# Altium footprint library LUCID_LIGHT_Passives.PcbLib: 7 footprints
Each footprint in its own frame and in the unit in brackets; x right, y up, seen from the top. Pads: shape width x height; smd on the part's side, far side on the other; paste and mask are expansions set on the pad; w line width, h text height; cw(c..) or ccw(c..) is an arc to the next point about the centre after c.
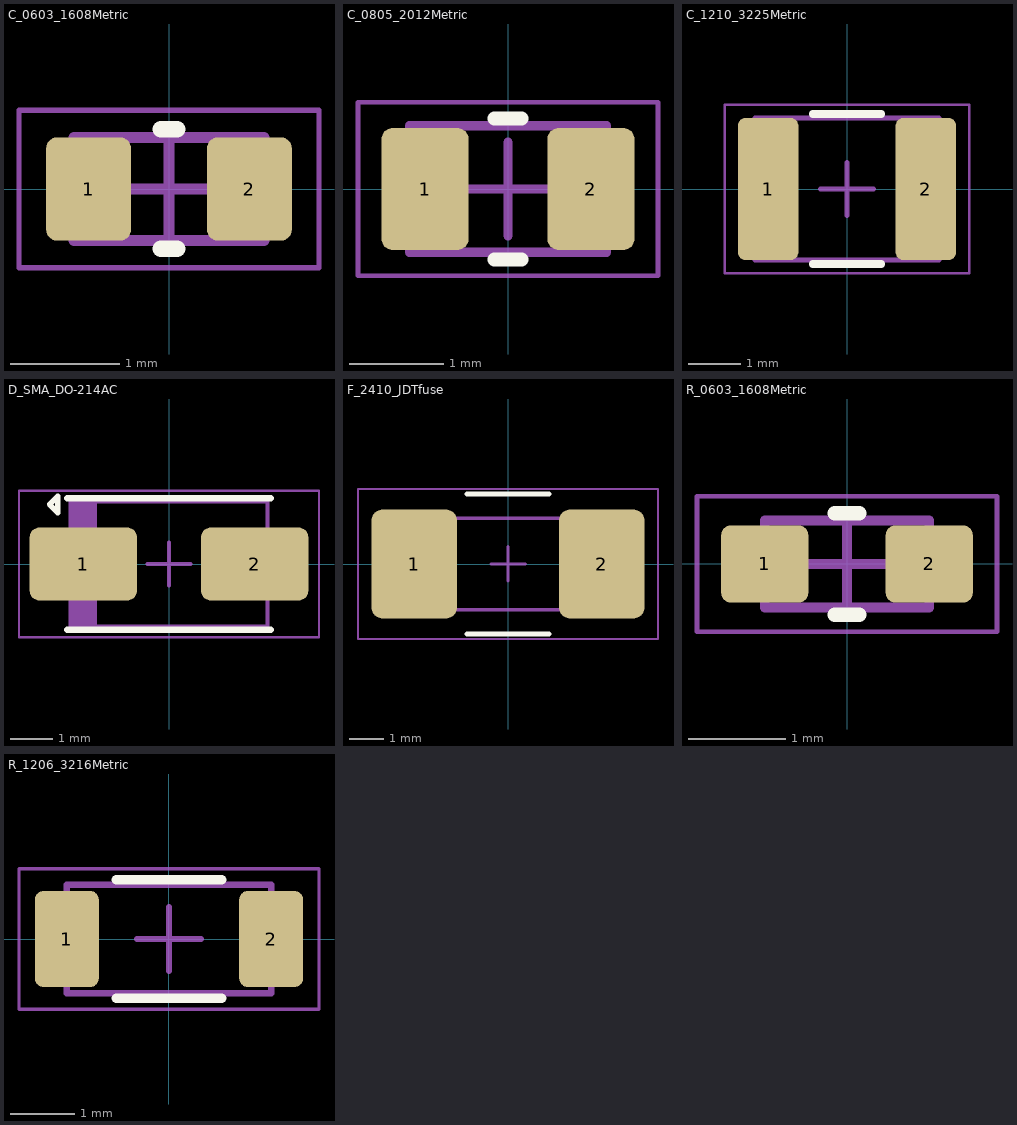
[diagram p0: the footprints below, top view; thin cyan lines are the x and y axes]

## C_0603_1608Metric [mm] "Chip Ceramic Capacitor, 2-Leads, Body 1.60x0.80mm, IPC Medium Density, Samsung 0603 Reference"
height 0.95
pads (2):
  rrect25% 0.78x0.95 smd: 1(-0.74,0) 2(0.74,0)
Top Overlay:
  lines w0.15: -0.075,-0.55 0.075,-0.55 ; -0.075,0.55 0.075,0.55
Mechanical 13:
  lines w0.1: -0.875,-0.475 -0.875,0.475 0.875,0.475 0.875,-0.475 -0.875,-0.475
Mechanical 15:
  lines w0.05: -1.38,-0.725 -1.38,0.725 1.38,0.725 1.38,-0.725 -1.38,-0.725
  lines w0.1: -0.475,0 0.475,0 ; 0,-0.475 0,0.475
3D body: height 0.95, standoff 0, extent -0.575,-0.475 0.575,0.475
3D body: height 0.95, standoff 0, extent -0.875,-0.475 -0.575,0.475
3D body: height 0.95, standoff 0, extent 0.575,-0.475 0.875,0.475

## C_0805_2012Metric [mm] "Chip Ceramic Capacitor, 2-Leads, Body 2.00x1.25mm, IPC Medium Density, Samsung 0805 Reference"
height 1.35
pads (2):
  rrect25% 0.93x1.3 smd: 1(-0.885,0) 2(0.885,0)
Top Overlay:
  lines w0.15: -0.145,-0.75 0.145,-0.75 ; -0.145,0.75 0.145,0.75
Mechanical 13:
  lines w0.1: -1.05,-0.675 1.05,-0.675 1.05,0.675 -1.05,0.675 -1.05,-0.675
Mechanical 15:
  lines w0.05: -1.6,-0.925 1.6,-0.925 1.6,0.925 -1.6,0.925 -1.6,-0.925
  lines w0.1: -0.5,0 0.5,0 ; 0,-0.5 0,0.5
3D body: height 1.35, standoff 0, extent 0.6,-0.675 1.05,0.675
3D body: height 1.35, standoff 0, extent -1.05,-0.675 -0.6,0.675
3D body: height 1.35, standoff 0, extent -0.6,-0.675 0.6,0.675

## C_1210_3225Metric [mm] "Chip Ceramic Capacitor, 2-Leads, Body 3.20x2.50mm, IPC Medium Density, KEMET 1210 Reference"
height 2.2
pads (2):
  rrect25% 1.15x2.7 smd: 1(-1.5,0) 2(1.5,0)
Top Overlay:
  lines w0.15: -0.65,-1.425 0.65,-1.425 ; -0.65,1.425 0.65,1.425
Mechanical 13:
  lines w0.1: -1.75,-1.35 -1.75,1.35 1.75,1.35 1.75,-1.35 -1.75,-1.35
Mechanical 15:
  lines w0.05: -2.325,-1.6 -2.325,1.6 2.325,1.6 2.325,-1.6 -2.325,-1.6
  lines w0.1: -0.5,0 0.5,0 ; 0,-0.5 0,0.5
3D body: height 2.2, standoff 0, extent -1.25,-1.35 1.25,1.35
3D body: height 2.2, standoff 0, extent -1.75,-1.35 -1.25,1.35
3D body: height 2.2, standoff 0, extent 1.25,-1.35 1.75,1.35

## D_SMA_DO-214AC [mm] "Molded Diode, 2-Leads, Body 4.30x2.61mm, IPC Medium Density"
height 2.4
pads (2):
  rrect25% 2.5x1.7 smd: 1(-2,0) 2(2,0)
Top Overlay:
  lines w0.127: -2.787,1.39 -2.597,1.2 -2.597,1.58 -2.787,1.39
  lines w0.15: -2.375,-1.535 2.375,-1.535 ; -2.375,1.535 2.375,1.535
Mechanical 13:
  rectangle: -2.3,-1.46 -1.681,1.46
  lines w0.1: -2.3,-1.46 -2.3,1.46 2.3,1.46 2.3,-1.46 -2.3,-1.46
Mechanical 15:
  lines w0.05: -3.5,-1.71 -3.5,1.71 3.5,1.71 3.5,-1.71 -3.5,-1.71
  lines w0.1: -0.5,0 0.5,0 ; 0,-0.5 0,0.5
3D body: height 2.4, standoff 0, extent -2.3,-1.46 2.3,1.46

## F_2410_JDTfuse [mm] "20A Fuse 72V"
height 2.94
pads (2):
  rrect25% 2.5x3.2 smd: 1(-2.75,0) 2(2.75,0)
Top Overlay:
  lines w0.15: -1.2,-2.05 1.2,-2.05 ; -1.2,2.05 1.2,2.05
Mechanical 13:
  lines w0.1: -3.09,-1.34 3.09,-1.34 3.09,1.34 -3.09,1.34 -3.09,-1.34
Mechanical 15:
  lines w0.05: -4.4,-2.2 4.4,-2.2 4.4,2.2 -4.4,2.2 -4.4,-2.2
  lines w0.1: -0.5,0 0.5,0 ; 0,-0.5 0,0.5
3D body: height 2.94, standoff 0, extent 1.7,-1.47 3.15,1.47
3D body: height 2.94, standoff 0, extent -3.15,-1.47 -1.7,1.47
3D body: height 2.94, standoff 0, extent -1.7,-1.47 1.7,1.47

## R_0603_1608Metric [mm] "Chip Resistor, 2-Leads, Body 1.60x0.80mm, IPC Medium Density"
height 0.55
pads (2):
  rrect25% 0.9x0.8 smd: 1(-0.85,0) 2(0.85,0)
Top Overlay:
  lines w0.15: -0.125,-0.525 0.125,-0.525 ; -0.125,0.525 0.125,0.525
Mechanical 13:
  lines w0.1: -0.85,-0.45 -0.85,0.45 0.85,0.45 0.85,-0.45 -0.85,-0.45
Mechanical 15:
  lines w0.05: -1.55,-0.7 -1.55,0.7 1.55,0.7 1.55,-0.7 -1.55,-0.7
  lines w0.1: -0.45,0 0.45,0 ; 0,-0.45 0,0.45
3D body: height 0.55, standoff 0, extent -0.6,-0.45 0.6,0.45
3D body: height 0.55, standoff 0, extent -0.85,-0.45 -0.6,0.45
3D body: height 0.55, standoff 0, extent 0.6,-0.45 0.85,0.45

## R_1206_3216Metric [mm] "Chip Resistor, 2-Leads, Body 3.20x1.60mm, IPC Medium Density, JLCPCB-compatible land pattern"
height 0.65
pads (2):
  rrect25% 1x1.5 smd: 1(-1.6,0) 2(1.6,0)
Top Overlay:
  lines w0.15: -0.825,-0.925 0.825,-0.925 ; -0.825,0.925 0.825,0.925
Mechanical 13:
  lines w0.1: -1.6,-0.85 -1.6,0.85 1.6,0.85 1.6,-0.85 -1.6,-0.85
Mechanical 15:
  lines w0.05: -2.35,-1.1 -2.35,1.1 2.35,1.1 2.35,-1.1 -2.35,-1.1
  lines w0.1: -0.5,0 0.5,0 ; 0,-0.5 0,0.5
3D body: height 0.65, standoff 0, extent -1.15,-0.85 1.15,0.85
3D body: height 0.65, standoff 0, extent -1.6,-0.85 -1.15,0.85
3D body: height 0.65, standoff 0, extent 1.15,-0.85 1.6,0.85